# EAGLE library part SY8205FCC (library SY8205FCC)
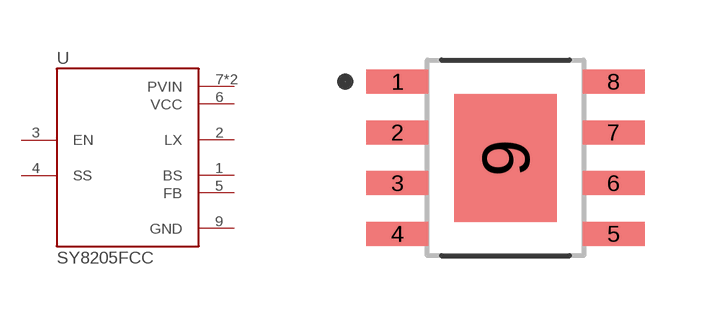
[diagram p0: symbol with the pads of VREG_SY8205FCC; footprint VREG_SY8205FCC]

Designator prefix U

## SY8205FCC (DATASHEET_URL: https://snapeda.s3.amazonaws.com/datasheets/2056-1809050154_Silergy-Corp-SY8205FCC_C111875.pdf; DESCRIPTION: High-Efficiency Fast Response，5A, 30V Input Synchronous Step Down Regulator; MANUFACTURER: Silergy; MAXIMUM_PACKAGE_HEIGHT: 1.60 mm; MPN: SY8205FCC; PARTREV: 0.4; Package: Package; SOURCE_URL: https://www.snapeda.com/parts/SY8205FCC/Silergy/view-part/; STANDARD: Manufacturer Recommendations)  [VREG_SY8205FCC]
1  BS  pas
2  LX  out
3  EN  pas
4  SS  pas
5  FB  pas
6  VCC  pwr
7  PVIN  pwr
8  PVIN  pwr
9  GND  pwr

## Footprint VREG_SY8205FCC (pad centres in mm)
smd 1.55 x 0.6: 1 -2.7,1.905; 2 -2.7,0.635; 3 -2.7,-0.635; 4 -2.7,-1.905; 5 2.7,-1.905; 6 2.7,-0.635; 7 2.7,0.635; 8 2.7,1.905
smd 2.55 x 3.2: 9 0,0